# Altium footprint library ATX6-D-ST.PcbLib: 1 footprints
Each footprint in its own frame and in the unit in brackets; x right, y up, seen from the top. Pads: shape width x height; smd on the part's side, far side on the other; paste and mask are expansions set on the pad; w line width, h text height; cw(c..) or ccw(c..) is an arc to the next point about the centre after c.
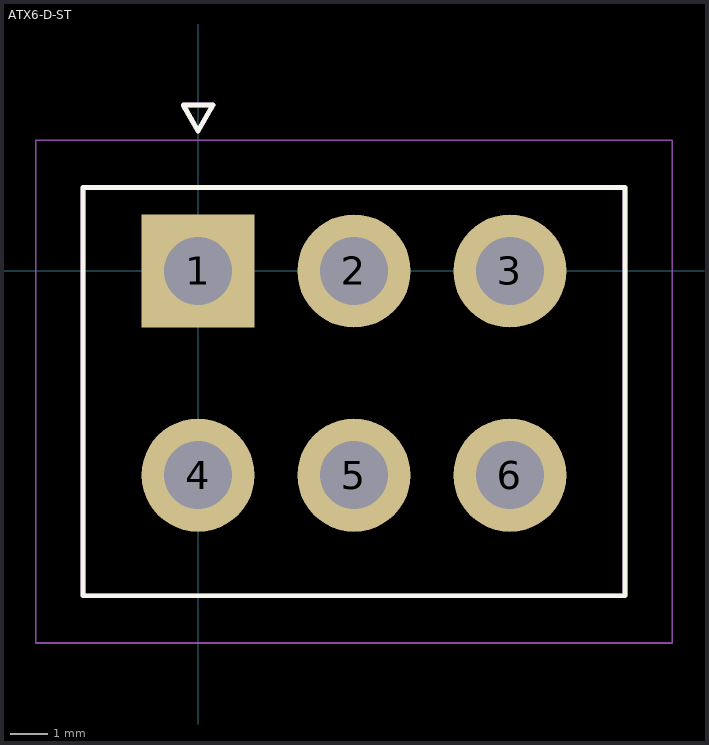
[diagram p0: the footprint, top view; thin cyan lines are the x and y axes]

## ATX6-D-ST [mil] "ATX6-D-ST"
height 503.94
pads (6):
  rect 120x120 hole 72 mask+3: 1(0,0)
  round 120 hole 72 mask+3: 2(165.35,0) 3(330.71,0) 4(0,-216.54) 5(165.35,-216.54) 6(330.71,-216.54)
Top Overlay:
  lines w5: -122.05,-344.49 -122.05,88.58 452.76,88.58 452.76,-344.49 -122.05,-344.49 ; -15.75,175.98 15.75,175.98 0,148.43 -15.75,175.98
Mechanical 13:
  lines w5: -122.05,-344.49 -122.05,88.58 452.76,88.58 452.76,-344.49 -122.05,-344.49 ; -15.75,175.98 15.75,175.98 0,148.43 -15.75,175.98
Mechanical 15:
  lines w1.97: -172.05,-394.49 -172.05,138.58 502.76,138.58 502.76,-394.49 -172.05,-394.49
3D body "ATX6-D-ST.STEP": height 503.94, standoff -137.8, extent -122.29,-344.09 452.4,88.98